# Altium footprint library Gateway_Academic.PcbLib: 49 footprints (part 4 of 4)
Each footprint in its own frame and in the unit in brackets; x right, y up, seen from the top. Pads: shape width x height; smd on the part's side, far side on the other; paste and mask are expansions set on the pad; w line width, h text height; cw(c..) or ccw(c..) is an arc to the next point about the centre after c.
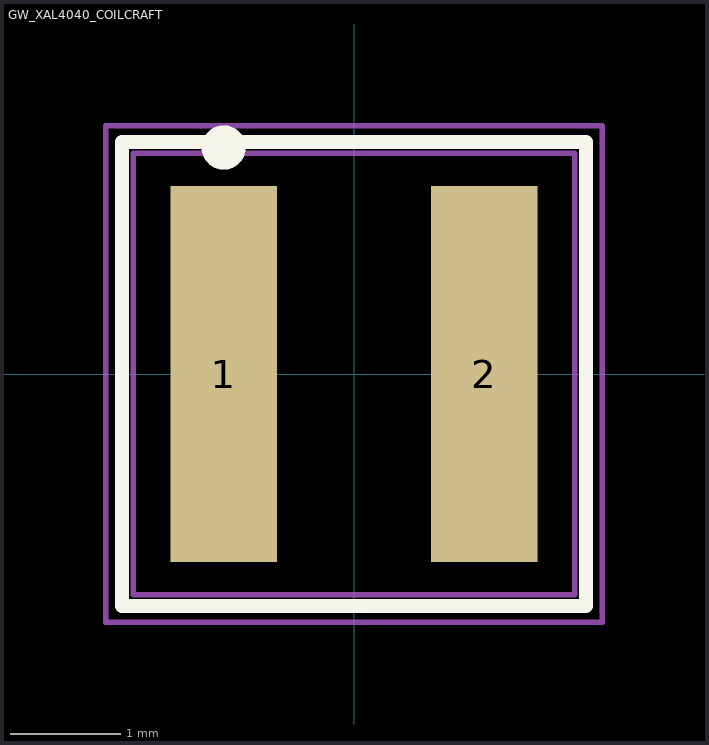
[diagram p3: the footprint, top view; thin cyan lines are the x and y axes]

## GW_XAL4040_COILCRAFT [mil] "Coilcraft document806-4 revised02/25/26 Recommended Land Pattern; Terminals assigned project1/2 for nonpolar winding; place high dv/dt at stripe/terminal1. Height 4.1mm. Mask/paste DFM pending."
pads (2):
  rect 38x134 smd: 1(-46.5,0) 2(46.5,0)
Top Overlay:
  circle w7.87: c-46.5,80.78 r3.94
  lines w5: -82.68,-82.68 82.68,-82.68 82.68,82.68 -82.68,82.68 -82.68,-82.68
Mechanical 1:
  lines w1.97: -78.74,-78.74 78.74,-78.74 78.74,78.74 -78.74,78.74 -78.74,-78.74
Mechanical 15:
  lines w1.97: -88.58,-88.58 88.58,-88.58 88.58,88.58 -88.58,88.58 -88.58,-88.58
3D body: height 161.42, standoff 0, extent -78.74,-78.74 78.74,78.74